# Altium footprint library ESDSBSLC3V3LTTP.PcbLib: 1 footprints
Each footprint in its own frame and in the unit in brackets; x right, y up, seen from the top. Pads: shape width x height; smd on the part's side, far side on the other; paste and mask are expansions set on the pad; w line width, h text height; cw(c..) or ccw(c..) is an arc to the next point about the centre after c.
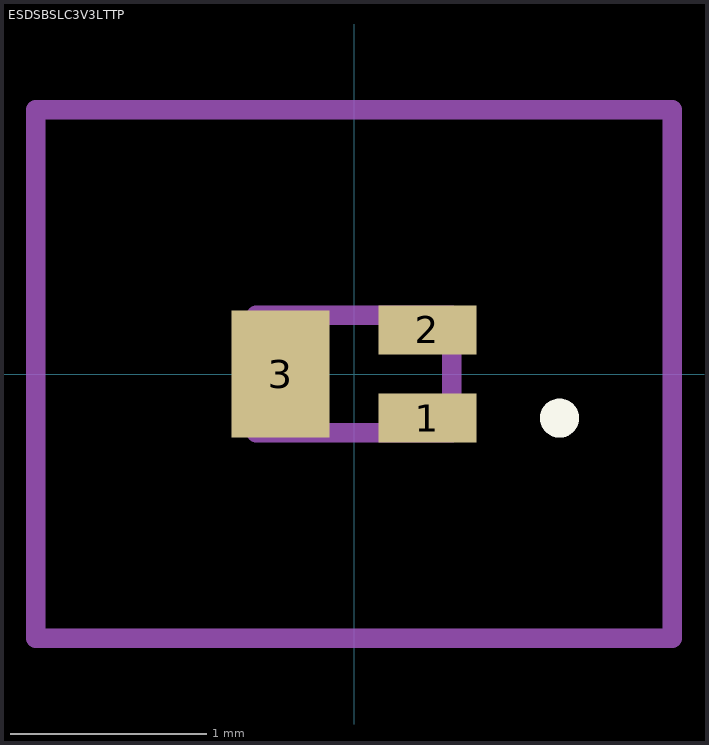
[diagram p0: the footprint, top view; thin cyan lines are the x and y axes]

## ESDSBSLC3V3LTTP [mm]
pads (3):
  rect 0.5x0.25 smd: 1(0.375,-0.225) 2(0.375,0.225)
  rect 0.5x0.65 smd: 3(-0.375,0)
Top Overlay:
  lines w0.1: 1,-0.225 cw(c1.05,-0.225) 1.1,-0.225 ; 1,-0.225 1,-0.225 ; 1,-0.225 ccw(c1.05,-0.225) 1.1,-0.225 ; 1.1,-0.225 1.1,-0.225
Mechanical 15:
  lines w0.1: -0.5,-0.3 0.5,-0.3 0.5,0.3 -0.5,0.3 -0.5,-0.3
Mechanical 20:
  lines w0.1: -1.625,-1.35 1.625,-1.35 1.625,1.35 -1.625,1.35 -1.625,-1.35